# Altium schematic symbol library RC0603FR-07210KL.SchLib: 1 symbol
Pins are listed as number, name and electrical type; pins without a type are passive.

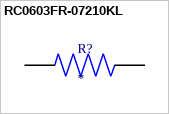
[diagram p0: symbol RC0603FR-07210KL]

## RC0603FR-07210KL
designator R?
210 kOhms Â±1% 0.1W, 1/10W Chip Resistor 0603 (1608 Metric) Moisture Resistant Thick Film; MF: Yageo; MP: RC0603FR-07210KL; SnapEDA_Link: https://www.snapeda.com/parts/RC0603FR-07210KL/Yageo/view-part/?ref=snap; Package: 1608 Yageo; Value: *; Check_prices: https://www.snapeda.com/parts/RC0603FR-07210KL/Yageo/view-part/?ref=eda
footprint RESC1608X55N
pins: 1, 2